# Altium schematic symbol library XM_Power.SchLib: 34 symbols
Pins are listed as number, name and electrical type; pins without a type are passive.

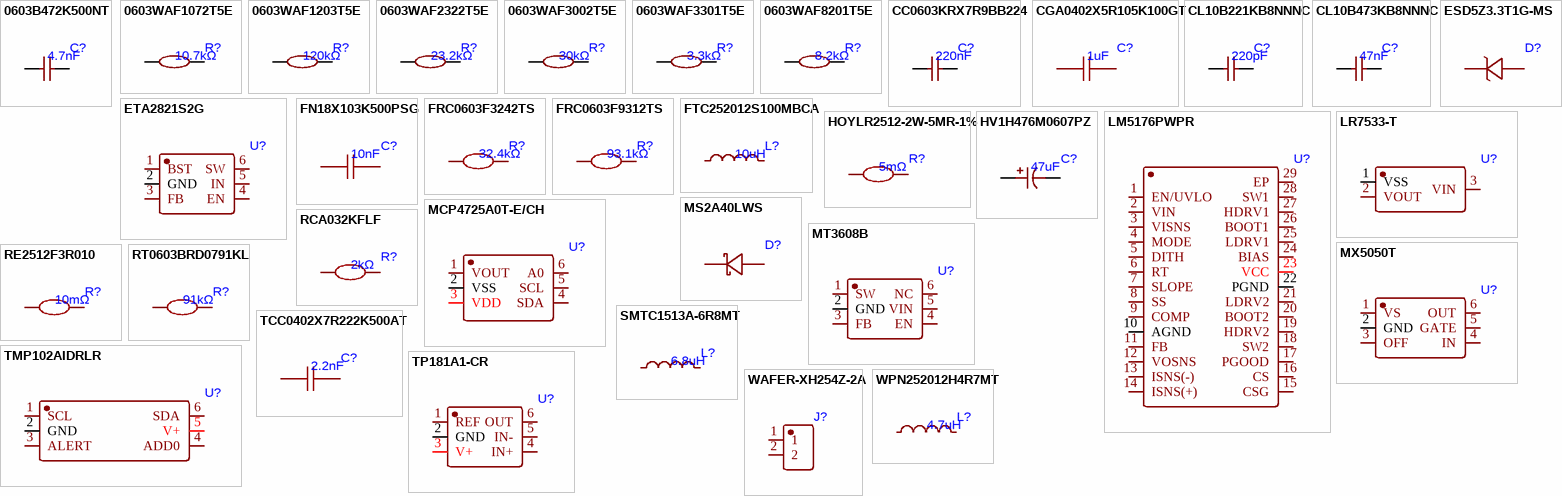
[diagram p0: symbols 0603B472K500NT to WPN252012H4R7MT]

## 0603B472K500NT
designator C?, comment 4.7nF
footprint C0603
pins: 1, 2

## 0603WAF1072T5E
designator R?, comment 10.7kΩ
footprint R0603
pins: 1, 2

## 0603WAF1203T5E
designator R?, comment 120kΩ
footprint R0603
pins: 1, 2

## 0603WAF2322T5E
designator R?, comment 23.2kΩ
footprint R0603
pins: 1, 2

## 0603WAF3002T5E
designator R?, comment 30kΩ
footprint R0603
pins: 1, 2

## 0603WAF3301T5E
designator R?, comment 3.3kΩ
footprint R0603
pins: 1, 2

## 0603WAF8201T5E
designator R?, comment 8.2kΩ
footprint R0603
pins: 1, 2

## CC0603KRX7R9BB224
designator C?, comment 220nF
footprint C0603
pins: 1, 2

## CGA0402X5R105K100GT
designator C?, comment 1uF
footprint C0402
pins: 1, 2

## CL10B221KB8NNNC
designator C?, comment 220pF
footprint C0603
pins: 1, 2

## CL10B473KB8NNNC
designator C?, comment 47nF
footprint C0603
pins: 1, 2

## ESD5Z3.3T1G-MS
designator D?
footprint SOD-523_L1.2-W0.8-LS1.6-RD
pins: 1 C, 2 A

## ETA2821S2G
designator U?
footprint SOT-23-6_L2.9-W1.6-P0.95-LS2.9-BL
pins: 1 BST, 2 GND, 3 FB, 4 EN, 5 IN, 6 SW

## FN18X103K500PSG
designator C?, comment 10nF
footprint C0603
pins: 1, 2

## FRC0603F3242TS
designator R?, comment 32.4kΩ
footprint R0603
pins: 1, 2

## FRC0603F9312TS
designator R?, comment 93.1kΩ
footprint R0603
pins: 1, 2

## FTC252012S100MBCA
designator L?, comment 10uH
footprint IND-SMD_L2.5-W2.0
pins: 1, 2

## HOYLR2512-2W-5MR-1%
designator R?, comment 5mΩ
footprint XM_R2512
pins: 1, 2

## HV1H476M0607PZ
designator C?, comment 47uF
footprint CAP-SMD_BD6.3-L6.6-W6.6-LS7.2-FD_3
pins: 1, 2

## LM5176PWPR
designator U?
footprint HTSSOP-28_L9.7-W4.4-P0.65-LS6.4-BL-EP
pins: 1 EN/UVLO, 2 VIN, 3 VISNS, 4 MODE, 5 DITH, 6 RT, 7 SLOPE, 8 SS, 9 COMP, 10 AGND, 11 FB, 12 VOSNS, 13 ISNS(-), 14 ISNS(+), 15 CSG, 16 CS, 17 PGOOD, 18 SW2, 19 HDRV2, 20 BOOT2, 21 LDRV2, 22 PGND, 23 VCC, 24 BIAS, 25 LDRV1, 26 BOOT1, 27 HDRV1, 28 SW1, 29 EP

## LR7533-T
designator U?
footprint SOT-23-3_L2.9-W1.6-P1.90-LS2.8-BR
pins: 1 VSS, 2 VOUT, 3 VIN

## MCP4725A0T-E/CH
designator U?
footprint SOT-23-6_L2.9-W1.6-P0.95-LS2.8-BL
pins: 1 VOUT, 2 VSS, 3 VDD, 4 SDA, 5 SCL, 6 A0

## MS2A40LWS
designator D?
footprint SOD-323_L1.7-W1.3-LS2.7-RD-1
pins: 1 K, 2 A

## MT3608B
designator U?
footprint SOT-23-6_L2.9-W1.6-P0.95-LS2.8-BR
pins: 1 SW, 2 GND, 3 FB, 4 EN, 5 VIN, 6 NC

## MX5050T
designator U?
footprint SOT-23-6_L2.9-W1.6-P0.95-LS2.8-BR
pins: 1 VS, 2 GND, 3 OFF, 4 IN, 5 GATE, 6 OUT

## RCA032KFLF
designator R?, comment 2kΩ
footprint R0603
pins: 1, 2

## RE2512F3R010
designator R?, comment 10mΩ
footprint XM_R2512
pins: 1, 2

## RT0603BRD0791KL
designator R?, comment 91kΩ
footprint R0603
pins: 1, 2

## SMTC1513A-6R8MT
designator L?, comment 6.8uH
footprint IND-SMD_L16.5-W15.5
pins: 1, 2

## TCC0402X7R222K500AT
designator C?, comment 2.2nF
footprint C0402
pins: 1, 2

## TMP102AIDRLR
designator U?
footprint SOT-563_L1.6-W1.2-P0.50-LS1.6-BR
pins: 1 SCL, 2 GND, 3 ALERT, 4 ADD0, 5 V+, 6 SDA

## TP181A1-CR
designator U?
footprint SC70-6_L2.1-W1.3-P0.65-LS2.3-BL
pins: 1 REF, 2 GND, 3 V+, 4 IN+, 5 IN-, 6 OUT

## WAFER-XH254Z-2A
designator J?
footprint CONN-TH_2P-P2.50_XH-2A_3045048
pins: 1, 2

## WPN252012H4R7MT
designator L?, comment 4.7uH
footprint IND-SMD_L2.5-W2.0_WPN252012H
pins: 1, 2